# Altium schematic symbol library ME6211C12M5G-N_C236672.SchLib: 1 symbol
Pins are listed as number, name and electrical type; pins without a type are passive.

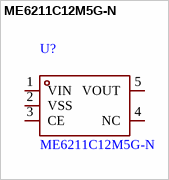
[diagram p0: symbol ME6211C12M5G-N]

## ME6211C12M5G-N
designator U?
1.2V 300mA 6V / 输出极性:正极 / 工作电压:6V / 输出电压:1.2V / 输出电流:300mA / 电源纹波抑制比(PSRR):70dB@(1kHz) / 输出类型:固定 / 型号:ME6211C12M5G-N / LCSC C236672 / 厂牌:MICRONE(南京微盟)
footprint SOT-23-5_L3.0-W1.7-P0.95-LS2.8-BL (PCB footprint)
pins: 1 VIN, 2 VSS, 3 CE, 4 NC, 5 VOUT